# Altium footprint library Connectors.PcbLib: 120 footprints (part 5 of 8)
Each footprint in its own frame and in the unit in brackets; x right, y up, seen from the top. Pads: shape width x height; smd on the part's side, far side on the other; paste and mask are expansions set on the pad; w line width, h text height; cw(c..) or ccw(c..) is an arc to the next point about the centre after c.
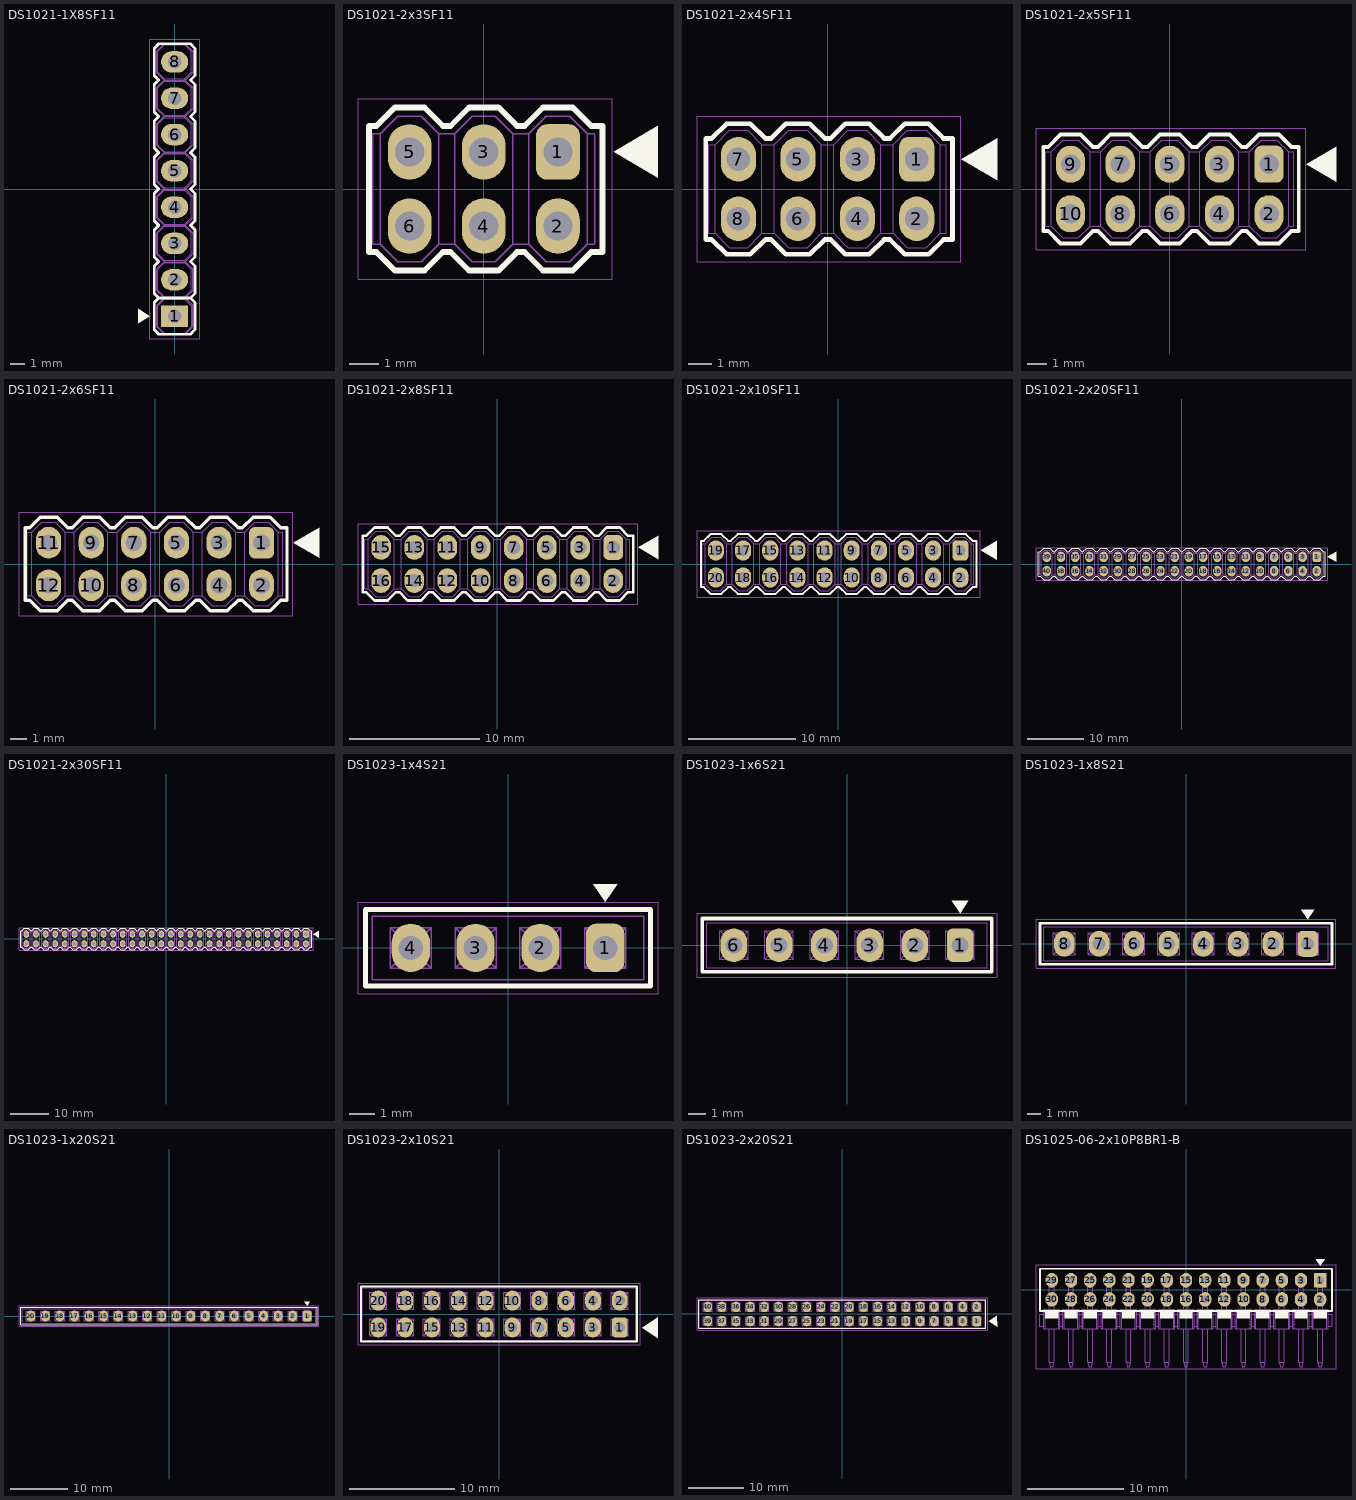
[diagram p4: the footprints below, top view; thin cyan lines are the x and y axes]

## DS1021-1X8SF11 [mm] "PLS-8 Connector, A = 3mm, B = 6.1mm"
pads (8):
  rect 1.9x1.5 hole 0.95: 1(0,-8.89)
  oval 1.9x1.5 hole 0.95: 2(0,-6.35) 3(0,-3.81) 4(0,-1.27) 5(0,1.27) 6(0,3.81) 7(0,6.35) 8(0,8.89)
Top Overlay:
  region: -1.746,-8.89 -2.54,-8.394 -2.54,-9.386
  lines w0.2: -1.111,-7.62 -1.429,-7.938 -1.429,-9.842 -1.111,-10.16 1.111,-10.16 1.429,-9.842 1.429,-7.937 1.111,-7.62 ; -1.111,-7.62 -1.429,-7.302 -1.429,-5.397 -1.111,-5.08 -1.429,-4.763 -1.429,-2.857 -1.111,-2.54 -1.429,-2.222 -1.429,-0.318 -1.111,0 -1.429,0.318 -1.429,2.222 -1.111,2.54 -1.429,2.857 -1.429,4.763 -1.111,5.08 -1.429,5.397 -1.429,7.302 -1.111,7.62 -1.429,7.938 -1.429,9.842 -1.111,10.16 1.111,10.16 1.429,9.843 1.429,7.938 1.111,7.62 1.429,7.303 1.429,5.398 1.111,5.08 1.429,4.763 1.429,2.858 1.111,2.54 1.429,2.223 1.429,0.318 1.111,0 1.429,-0.317 1.429,-2.222 1.111,-2.54 1.429,-2.857 1.429,-4.762 1.111,-5.08 1.429,-5.397 1.429,-7.302 1.111,-7.62 ; -1.111,-7.62 1.111,-7.62
Top Courtyard:
  lines w0.025: -1.75,-10.47 1.75,-10.47 1.75,10.47 -1.75,10.47 -1.75,-10.47
Top Assembly:
  drawing of 1025 lines, arcs and shapes, not listed
  text ".Designator" at 2.993,-4.511 h2
3D body "1x8 TH Pitch 2_54mm.X_T": height 9.2, standoff -3.5, extent -1.27,-10.16 1.27,10.16

## DS1021-2x3SF11 [mm] "PLD-6 Connector, A = 3mm, B = 6.1mm"
height 8.5
pads (6):
  rrect50% 1.5x1.9 hole 1: 1(2.54,1.27)
  oval 1.5x1.9 hole 1: 2(2.54,-1.27) 3(0,1.27) 4(0,-1.27) 5(-2.54,1.27) 6(-2.54,-1.27)
Top Overlay:
  region: 4.445,1.27 5.969,2.159 5.969,0.381
  lines w0.2: -3.937,-2.159 -3.937,2.159 -3.683,2.159 -3.048,2.794 -2.032,2.794 -1.397,2.159 -1.143,2.159 -0.508,2.794 0.508,2.794 1.143,2.159 1.397,2.159 2.032,2.794 3.048,2.794 3.683,2.159 4.064,2.159 4.064,-2.159 3.683,-2.159 3.048,-2.794 2.032,-2.794 1.397,-2.159 1.143,-2.159 0.508,-2.794 -0.508,-2.794 -1.143,-2.159 -1.397,-2.159 -2.032,-2.794 -3.048,-2.794 -3.683,-2.159 -3.937,-2.159
Top Courtyard:
  lines w0.025: -4.31,-3.1 -4.31,3.1 4.41,3.1 4.41,-3.1 -4.31,-3.1
Top Assembly:
  lines w0.05: -3.54,-1.9 -2.94,-2.5 -2.14,-2.5 -1.54,-1.9 ; -3.54,-1.9 -3.81,-1.9 -3.81,1.9 -3.54,1.9 ; -3.54,-1.9 -3.54,1.9 ; -3.54,1.9 -2.94,2.5 -2.14,2.5 -1.54,1.9 ; -2.86,-1.59 -2.673,-1.403 ; -2.86,-1.59 -2.22,-1.59 ; -2.86,-1.59 -2.86,-0.95 ; -2.86,-0.95 -2.673,-1.137 ; -2.86,-0.95 -2.22,-0.95 ; -2.86,0.95 -2.673,1.137 ; -2.86,0.95 -2.86,1.59 ; -2.86,0.95 -2.22,0.95 ; -2.86,1.59 -2.673,1.403 ; -2.86,1.59 -2.22,1.59 ; -2.673,-1.403 -2.407,-1.403 ; -2.673,-1.403 -2.673,-1.137 ; -2.673,-1.137 -2.407,-1.137 ; -2.673,1.137 -2.673,1.403 ; -2.673,1.137 -2.407,1.137 ; -2.673,1.403 -2.407,1.403 ; -2.407,-1.403 -2.22,-1.59 ; -2.407,-1.403 -2.407,-1.137 ; -2.407,-1.137 -2.22,-0.95 ; -2.407,1.137 -2.22,0.95 ; -2.407,1.137 -2.407,1.403 ; -2.407,1.403 -2.22,1.59 ; -2.22,-1.59 -2.22,-0.95 ; -2.22,0.95 -2.22,1.59 ; -1.54,-1.9 -1.54,1.9 ; -1.54,-1.9 -1,-1.9 ; -1.54,1.9 -1,1.9 ; -1,-1.9 -0.4,-2.5 0.4,-2.5 1,-1.9 ; -1,-1.9 -1,1.9 ; -1,1.9 -0.4,2.5 0.4,2.5 1,1.9 ; -0.32,-1.59 -0.133,-1.403 ; -0.32,-1.59 0.32,-1.59 ; -0.32,-1.59 -0.32,-0.95 ; -0.32,-0.95 -0.133,-1.137 ; -0.32,-0.95 0.32,-0.95 ; -0.32,0.95 -0.133,1.137 ; -0.32,0.95 -0.32,1.59 ; -0.32,0.95 0.32,0.95 ; -0.32,1.59 -0.133,1.403 ; -0.32,1.59 0.32,1.59 ; -0.133,-1.403 0.133,-1.403 ; -0.133,-1.403 -0.133,-1.137 ; -0.133,-1.137 0.133,-1.137 ; -0.133,1.137 -0.133,1.403 ; -0.133,1.137 0.133,1.137 ; -0.133,1.403 0.133,1.403 ; 0.133,-1.403 0.32,-1.59 ; 0.133,-1.403 0.133,-1.137 ; 0.133,-1.137 0.32,-0.95 ; 0.133,1.137 0.32,0.95 ; 0.133,1.137 0.133,1.403 ; 0.133,1.403 0.32,1.59 ; 0.32,-1.59 0.32,-0.95 ; 0.32,0.95 0.32,1.59 ; 1,-1.9 1,1.9 ; 1,-1.9 1.54,-1.9 ; 1,1.9 1.54,1.9 ; 1.54,-1.9 2.14,-2.5 2.94,-2.5 3.54,-1.9 ; 1.54,-1.9 1.54,1.9 ; 1.54,1.9 2.14,2.5 2.94,2.5 3.54,1.9 ; 2.22,-1.59 2.407,-1.403 ; 2.22,-1.59 2.86,-1.59 ; 2.22,-1.59 2.22,-0.95 ; 2.22,-0.95 2.407,-1.137 ; 2.22,-0.95 2.86,-0.95 ; 2.22,0.95 2.407,1.137 ; 2.22,0.95 2.22,1.59 ; 2.22,0.95 2.86,0.95 ; 2.22,1.59 2.407,1.403 ; 2.22,1.59 2.86,1.59 ; 2.407,-1.403 2.673,-1.403 ; 2.407,-1.403 2.407,-1.137 ; 2.407,-1.137 2.673,-1.137 ; 2.407,1.137 2.407,1.403 ; 2.407,1.137 2.673,1.137 ; 2.407,1.403 2.673,1.403 ; 2.673,-1.403 2.86,-1.59 ; 2.673,-1.403 2.673,-1.137 ; 2.673,-1.137 2.86,-0.95 ; 2.673,1.137 2.86,0.95 ; 2.673,1.137 2.673,1.403 ; 2.673,1.403 2.86,1.59 ; 2.86,-1.59 2.86,-0.95 ; 2.86,0.95 2.86,1.59 ; 3.54,-1.9 3.54,1.9 ; 3.54,-1.9 3.81,-1.9 3.81,1.9 3.54,1.9
  text ".Designator" at -4.511,3.357 h2
3D body "PLD_6.x_t": height 8.7, standoff -2.9, extent -3.81,-2.5 3.81,2.5

## DS1021-2x4SF11 [mm] "PLD-8 Connector, A = 3mm, B = 6.1mm"
height 8.5
pads (8):
  rrect50% 1.5x1.9 hole 1: 1(3.81,1.27)
  oval 1.5x1.9 hole 1: 2(3.81,-1.27) 3(1.27,1.27) 4(1.27,-1.27) 5(-1.27,1.27) 6(-1.27,-1.27) 7(-3.81,1.27) 8(-3.81,-1.27)
Top Overlay:
  region: 5.715,1.27 7.239,2.159 7.239,0.381
  lines w0.2: -5.207,-2.159 -5.207,2.159 -4.953,2.159 -4.318,2.794 -3.302,2.794 -2.667,2.159 -2.413,2.159 -1.778,2.794 -0.762,2.794 -0.127,2.159 0.127,2.159 0.762,2.794 1.778,2.794 2.413,2.159 2.667,2.159 3.302,2.794 4.318,2.794 4.953,2.159 5.334,2.159 5.334,-2.159 4.953,-2.159 4.318,-2.794 3.302,-2.794 2.667,-2.159 2.413,-2.159 1.778,-2.794 0.762,-2.794 0.127,-2.159 -0.127,-2.159 -0.762,-2.794 -1.778,-2.794 -2.413,-2.159 -2.667,-2.159 -3.302,-2.794 -4.318,-2.794 -4.953,-2.159 -5.207,-2.159
Top Courtyard:
  lines w0.025: -5.58,-3.1 -5.58,3.1 5.68,3.1 5.68,-3.1 -5.58,-3.1
Top Assembly:
  lines w0.05: -4.81,-1.9 -4.81,1.9 ; -4.81,-1.9 -4.21,-2.5 -3.41,-2.5 -2.81,-1.9 ; -4.81,-1.9 -4.81,1.9 ; -4.81,-1.9 -5.08,-1.9 -5.08,1.9 -4.81,1.9 ; -4.81,1.9 -4.21,2.5 -3.41,2.5 -2.81,1.9 ; -4.13,-1.59 -3.943,-1.403 ; -4.13,-1.59 -3.49,-1.59 ; -4.13,-1.59 -4.13,-0.95 ; -4.13,-0.95 -3.943,-1.137 ; -4.13,-0.95 -3.49,-0.95 ; -4.13,0.95 -3.943,1.137 ; -4.13,0.95 -3.49,0.95 ; -4.13,0.95 -4.13,1.59 ; -4.13,1.59 -3.943,1.403 ; -4.13,1.59 -3.49,1.59 ; -3.943,-1.403 -3.677,-1.403 ; -3.943,-1.403 -3.943,-1.137 ; -3.943,-1.137 -3.677,-1.137 ; -3.943,1.137 -3.677,1.137 ; -3.943,1.137 -3.943,1.403 ; -3.943,1.403 -3.677,1.403 ; -3.677,-1.403 -3.49,-1.59 ; -3.677,-1.403 -3.677,-1.137 ; -3.677,-1.137 -3.49,-0.95 ; -3.677,1.137 -3.677,1.403 ; -3.677,1.137 -3.49,0.95 ; -3.677,1.403 -3.49,1.59 ; -3.49,-1.59 -3.49,-0.95 ; -3.49,0.95 -3.49,1.59 ; -2.81,-1.9 -2.81,1.9 ; -2.81,-1.9 -2.27,-1.9 ; -2.81,1.9 -2.27,1.9 ; -2.27,-1.9 -1.67,-2.5 -0.87,-2.5 -0.27,-1.9 ; -2.27,-1.9 -2.27,1.9 ; -2.27,1.9 -1.67,2.5 -0.87,2.5 -0.27,1.9 ; -1.59,-1.59 -1.403,-1.403 ; -1.59,-1.59 -0.95,-1.59 ; -1.59,-1.59 -1.59,-0.95 ; -1.59,-0.95 -1.403,-1.137 ; -1.59,-0.95 -0.95,-0.95 ; -1.59,0.95 -1.403,1.137 ; -1.59,0.95 -1.59,1.59 ; -1.59,0.95 -0.95,0.95 ; -1.59,1.59 -1.403,1.403 ; -1.59,1.59 -0.95,1.59 ; -1.403,-1.403 -1.137,-1.403 ; -1.403,-1.403 -1.403,-1.137 ; -1.403,-1.137 -1.137,-1.137 ; -1.403,1.137 -1.403,1.403 ; -1.403,1.137 -1.137,1.137 ; -1.403,1.403 -1.137,1.403 ; -1.137,-1.403 -0.95,-1.59 ; -1.137,-1.403 -1.137,-1.137 ; -1.137,-1.137 -0.95,-0.95 ; -1.137,1.137 -0.95,0.95 ; -1.137,1.137 -1.137,1.403 ; -1.137,1.403 -0.95,1.59 ; -0.95,-1.59 -0.95,-0.95 ; -0.95,0.95 -0.95,1.59 ; -0.27,-1.9 -0.27,1.9 ; -0.27,-1.9 0.27,-1.9 ; -0.27,1.9 0.27,1.9 ; 0.27,-1.9 0.87,-2.5 1.67,-2.5 2.27,-1.9 ; 0.27,-1.9 0.27,1.9 ; 0.27,1.9 0.87,2.5 1.67,2.5 2.27,1.9 ; 0.95,-1.59 1.137,-1.403 ; 0.95,-1.59 1.59,-1.59 ; 0.95,-1.59 0.95,-0.95 ; 0.95,-0.95 1.137,-1.137 ; 0.95,-0.95 1.59,-0.95 ; 0.95,0.95 1.137,1.137 ; 0.95,0.95 0.95,1.59 ; 0.95,0.95 1.59,0.95 ; 0.95,1.59 1.137,1.403 ; 0.95,1.59 1.59,1.59 ; 1.137,-1.403 1.403,-1.403 ; 1.137,-1.403 1.137,-1.137 ; 1.137,-1.137 1.403,-1.137 ; 1.137,1.137 1.137,1.403 ; 1.137,1.137 1.403,1.137 ; 1.137,1.403 1.403,1.403 ; 1.403,-1.403 1.59,-1.59 ; 1.403,-1.403 1.403,-1.137 ; 1.403,-1.137 1.59,-0.95 ; 1.403,1.137 1.59,0.95 ; 1.403,1.137 1.403,1.403 ; 1.403,1.403 1.59,1.59 ; 1.59,-1.59 1.59,-0.95 ; 1.59,0.95 1.59,1.59 ; 2.27,-1.9 2.27,1.9 ; 2.27,-1.9 2.81,-1.9 ; 2.27,1.9 2.81,1.9 ; 2.81,-1.9 3.41,-2.5 4.21,-2.5 4.81,-1.9 ; 2.81,-1.9 2.81,1.9 ; 2.81,1.9 3.41,2.5 4.21,2.5 4.81,1.9 ; 3.49,-1.59 3.677,-1.403 ; 3.49,-1.59 4.13,-1.59 ; 3.49,-1.59 3.49,-0.95 ; 3.49,-0.95 3.677,-1.137 ; 3.49,-0.95 4.13,-0.95 ; 3.49,0.95 3.677,1.137 ; 3.49,0.95 3.49,1.59 ; 3.49,0.95 4.13,0.95 ; 3.49,1.59 3.677,1.403 ; 3.49,1.59 4.13,1.59 ; 3.677,-1.403 3.943,-1.403 ; 3.677,-1.403 3.677,-1.137 ; 3.677,-1.137 3.943,-1.137 ; 3.677,1.137 3.677,1.403 ; 3.677,1.137 3.943,1.137 ; 3.677,1.403 3.943,1.403 ; 3.943,-1.403 4.13,-1.59 ; 3.943,-1.403 3.943,-1.137 ; 3.943,-1.137 4.13,-0.95 ; 3.943,1.137 4.13,0.95 ; 3.943,1.137 3.943,1.403 ; 3.943,1.403 4.13,1.59 ; 4.13,-1.59 4.13,-0.95 ; 4.13,0.95 4.13,1.59 ; 4.81,-1.9 4.81,1.9 ; 4.81,-1.9 5.08,-1.9 5.08,1.9 4.81,1.9
  text ".Designator" at -4.511,3.357 h2
3D body "PLD_8.x_t": height 8.7, standoff -2.9, extent -5.08,-2.5 5.08,2.5

## DS1021-2x5SF11 [mm] "PLD-10 Connector, A = 3mm, B = 6.1mm"
height 8.5
pads (10):
  rrect50% 1.5x1.9 hole 1: 1(5.08,1.27)
  oval 1.5x1.9 hole 1: 2(5.08,-1.27) 3(2.54,1.27) 4(2.54,-1.27) 5(0,1.27) 6(0,-1.27) 7(-2.54,1.27) 8(-2.54,-1.27) 9(-5.08,1.27) 10(-5.08,-1.27)
Top Overlay:
  region: 6.985,1.27 8.509,2.159 8.509,0.381
  lines w0.2: -6.477,-2.159 -6.477,2.159 -6.223,2.159 -5.588,2.794 -4.572,2.794 -3.937,2.159 -3.683,2.159 -3.048,2.794 -2.032,2.794 -1.397,2.159 -1.143,2.159 -0.508,2.794 0.508,2.794 1.143,2.159 1.397,2.159 2.032,2.794 3.048,2.794 3.683,2.159 3.937,2.159 4.572,2.794 5.588,2.794 6.223,2.159 6.604,2.159 6.604,-2.159 6.223,-2.159 5.588,-2.794 4.572,-2.794 3.937,-2.159 3.683,-2.159 3.048,-2.794 2.032,-2.794 1.397,-2.159 1.143,-2.159 0.508,-2.794 -0.508,-2.794 -1.143,-2.159 -1.397,-2.159 -2.032,-2.794 -3.048,-2.794 -3.683,-2.159 -3.937,-2.159 -4.572,-2.794 -5.588,-2.794 -6.223,-2.159 -6.477,-2.159
Top Courtyard:
  lines w0.025: -6.85,-3.1 -6.85,3.1 6.95,3.1 6.95,-3.1 -6.85,-3.1
Top Assembly:
  drawing of 174 lines, arcs and shapes, not listed
  text ".Designator" at -4.511,3.357 h2
3D body "PLD_10.x_t": height 8.7, standoff -2.9, extent -6.35,-2.5 6.35,2.5

## DS1021-2x6SF11 [mm] "PLD-12 Connector, A = 3mm, B = 6.1mm"
height 8.5
pads (12):
  rrect50% 1.5x1.9 hole 1: 1(6.35,1.27)
  oval 1.5x1.9 hole 1: 2(6.35,-1.27) 3(3.81,1.27) 4(3.81,-1.27) 5(1.27,1.27) 6(1.27,-1.27) 7(-1.27,1.27) 8(-1.27,-1.27) 9(-3.81,1.27) 10(-3.81,-1.27) 11(-6.35,1.27) 12(-6.35,-1.27)
Top Overlay:
  region: 8.255,1.27 9.779,2.159 9.779,0.381
  lines w0.2: -7.747,-2.159 -7.493,-2.159 -6.858,-2.794 -5.842,-2.794 -5.207,-2.159 -4.953,-2.159 -4.318,-2.794 -3.302,-2.794 -2.667,-2.159 -2.413,-2.159 -1.778,-2.794 -0.762,-2.794 -0.127,-2.159 0.127,-2.159 0.762,-2.794 1.778,-2.794 2.413,-2.159 2.667,-2.159 3.302,-2.794 4.318,-2.794 4.953,-2.159 5.207,-2.159 5.842,-2.794 6.858,-2.794 7.493,-2.159 7.874,-2.159 7.874,2.159 7.493,2.159 6.858,2.794 5.842,2.794 5.207,2.159 4.953,2.159 4.318,2.794 3.302,2.794 2.667,2.159 2.413,2.159 1.778,2.794 0.762,2.794 0.127,2.159 -0.127,2.159 -0.762,2.794 -1.778,2.794 -2.413,2.159 -2.667,2.159 -3.302,2.794 -4.318,2.794 -4.953,2.159 -5.207,2.159 -5.842,2.794 -6.858,2.794 -7.493,2.159 -7.747,2.159 -7.747,-2.159
Top Courtyard:
  lines w0.025: -8.12,-3.1 8.22,-3.1 8.22,3.1 -8.12,3.1 -8.12,-3.1
Top Assembly:
  drawing of 208 lines, arcs and shapes, not listed
  text ".Designator" at -4.511,3.357 h2
3D body "PLD_12.x_t": height 8.7, standoff -2.9, extent -7.62,-2.5 7.62,2.5

## DS1021-2x8SF11 [mm] "PLD-16 Connector, A = 3mm, B = 6.1mm"
height 8.5
pads (16):
  rrect50% 1.5x1.9 hole 1: 1(8.89,1.27)
  oval 1.5x1.9 hole 1: 2(8.89,-1.27) 3(6.35,1.27) 4(6.35,-1.27) 5(3.81,1.27) 6(3.81,-1.27) 7(1.27,1.27) 8(1.27,-1.27) 9(-1.27,1.27) 10(-1.27,-1.27) 11(-3.81,1.27) 12(-3.81,-1.27) 13(-6.35,1.27) 14(-6.35,-1.27) 15(-8.89,1.27) 16(-8.89,-1.27)
Top Overlay:
  region: 10.795,1.27 12.319,2.159 12.319,0.381
  lines w0.2: -10.287,-2.159 -10.287,2.159 -10.033,2.159 -9.398,2.794 -8.382,2.794 -7.747,2.159 -7.493,2.159 -6.858,2.794 -5.842,2.794 -5.207,2.159 -4.953,2.159 -4.318,2.794 -3.302,2.794 -2.667,2.159 -2.413,2.159 -1.778,2.794 -0.762,2.794 -0.127,2.159 0.127,2.159 0.762,2.794 1.778,2.794 2.413,2.159 2.667,2.159 3.302,2.794 4.318,2.794 4.953,2.159 5.207,2.159 5.842,2.794 6.858,2.794 7.493,2.159 7.747,2.159 8.382,2.794 9.398,2.794 10.033,2.159 10.414,2.159 10.414,-2.159 10.033,-2.159 9.398,-2.794 8.382,-2.794 7.747,-2.159 7.493,-2.159 6.858,-2.794 5.842,-2.794 5.207,-2.159 4.953,-2.159 4.318,-2.794 3.302,-2.794 2.667,-2.159 2.413,-2.159 1.778,-2.794 0.762,-2.794 0.127,-2.159 -0.127,-2.159 -0.762,-2.794 -1.778,-2.794 -2.413,-2.159 -2.667,-2.159 -3.302,-2.794 -4.318,-2.794 -4.953,-2.159 -5.207,-2.159 -5.842,-2.794 -6.858,-2.794 -7.493,-2.159 -7.747,-2.159 -8.382,-2.794 -9.398,-2.794 -10.033,-2.159 -10.287,-2.159
Top Courtyard:
  lines w0.025: -10.66,-3.1 -10.66,3.1 10.76,3.1 10.76,-3.1 -10.66,-3.1
Top Assembly:
  drawing of 276 lines, arcs and shapes, not listed
  text ".Designator" at -4.511,3.357 h2
3D body "PLD_16.x_t": height 8.7, standoff -2.9, extent -10.16,-2.5 10.16,2.5

## DS1021-2x10SF11 [mm] "PLD-20 Connector, A = 3mm, B = 6.1mm"
height 8.5
pads (20):
  rrect50% 1.5x1.9 hole 1: 1(11.43,1.27)
  oval 1.5x1.9 hole 1: 2(11.43,-1.27) 3(8.89,1.27) 4(8.89,-1.27) 5(6.35,1.27) 6(6.35,-1.27) 7(3.81,1.27) 8(3.81,-1.27) 9(1.27,1.27) 10(1.27,-1.27) 11(-1.27,1.27) 12(-1.27,-1.27) 13(-3.81,1.27) 14(-3.81,-1.27) 15(-6.35,1.27) 16(-6.35,-1.27) 17(-8.89,1.27) 18(-8.89,-1.27) 19(-11.43,1.27) 20(-11.43,-1.27)
Top Overlay:
  region: 13.335,1.27 14.859,2.159 14.859,0.381
  lines w0.2: -12.827,-2.159 -12.827,2.159 -12.573,2.159 -11.938,2.794 -10.922,2.794 -10.287,2.159 -10.033,2.159 -9.398,2.794 -8.382,2.794 -7.747,2.159 -7.493,2.159 -6.858,2.794 -5.842,2.794 -5.207,2.159 -4.953,2.159 -4.318,2.794 -3.302,2.794 -2.667,2.159 -2.413,2.159 -1.778,2.794 -0.762,2.794 -0.127,2.159 0.127,2.159 0.762,2.794 1.778,2.794 2.413,2.159 2.667,2.159 3.302,2.794 4.318,2.794 4.953,2.159 5.207,2.159 5.842,2.794 6.858,2.794 7.493,2.159 7.747,2.159 8.382,2.794 9.398,2.794 10.033,2.159 10.287,2.159 10.922,2.794 11.938,2.794 12.573,2.159 12.954,2.159 12.954,-2.159 12.573,-2.159 11.938,-2.794 10.922,-2.794 10.287,-2.159 10.033,-2.159 9.398,-2.794 8.382,-2.794 7.747,-2.159 7.493,-2.159 6.858,-2.794 5.842,-2.794 5.207,-2.159 4.953,-2.159 4.318,-2.794 3.302,-2.794 2.667,-2.159 2.413,-2.159 1.778,-2.794 0.762,-2.794 0.127,-2.159 -0.127,-2.159 -0.762,-2.794 -1.778,-2.794 -2.413,-2.159 -2.667,-2.159 -3.302,-2.794 -4.318,-2.794 -4.953,-2.159 -5.207,-2.159 -5.842,-2.794 -6.858,-2.794 -7.493,-2.159 -7.747,-2.159 -8.382,-2.794 -9.398,-2.794 -10.033,-2.159 -10.287,-2.159 -10.922,-2.794 -11.938,-2.794 -12.573,-2.159 -12.827,-2.159
Top Courtyard:
  lines w0.025: -13.2,-3.1 -13.2,3.1 13.3,3.1 13.3,-3.1 -13.2,-3.1
Top Assembly:
  drawing of 344 lines, arcs and shapes, not listed
  text ".Designator" at -4.511,3.357 h2
3D body "PLD_20.x_t": height 8.7, standoff -2.9, extent -12.7,-2.5 12.7,2.5

## DS1021-2x20SF11 [mm] "PLD-40 Connector, A = 3mm, B = 6.1mm"
height 8.5
pads (40):
  rrect50% 1.5x1.9 hole 1: 1(24.13,1.27)
  oval 1.5x1.9 hole 1: 2(24.13,-1.27) 3(21.59,1.27) 4(21.59,-1.27) 5(19.05,1.27) 6(19.05,-1.27) 7(16.51,1.27) 8(16.51,-1.27) 9(13.97,1.27) 10(13.97,-1.27) 11(11.43,1.27) 12(11.43,-1.27) 13(8.89,1.27) 14(8.89,-1.27) 15(6.35,1.27) 16(6.35,-1.27) 17(3.81,1.27) 18(3.81,-1.27) 19(1.27,1.27) 20(1.27,-1.27) 21(-1.27,1.27) 22(-1.27,-1.27) 23(-3.81,1.27) 24(-3.81,-1.27) 25(-6.35,1.27) 26(-6.35,-1.27) 27(-8.89,1.27) 28(-8.89,-1.27) 29(-11.43,1.27) 30(-11.43,-1.27) 31(-13.97,1.27) 32(-13.97,-1.27) 33(-16.51,1.27) 34(-16.51,-1.27) 35(-19.05,1.27) 36(-19.05,-1.27) 37(-21.59,1.27) 38(-21.59,-1.27) 39(-24.13,1.27) 40(-24.13,-1.27)
Top Overlay:
  drawing of 165 lines, arcs and shapes, not listed
Top Courtyard:
  lines w0.025: -26.05,-2.9 -26.05,2.9 26.05,2.9 26.05,-2.9 -26.05,-2.9
Top Assembly:
  drawing of 684 lines, arcs and shapes, not listed
  text ".Designator" at -4.511,3.357 h2
3D body "PLD_40.x_t": height 8.7, standoff -2.9, extent -25.4,-2.5 25.4,2.5

## DS1021-2x30SF11 [mm] "PLD-60 Connector, A = 3mm, B = 6.1mm"
height 8.5
pads (60):
  rrect50% 1.5x1.9 hole 1: 1(36.83,1.27)
  oval 1.5x1.9 hole 1: 2(36.83,-1.27) 3(34.29,1.27) 4(34.29,-1.27) 5(31.75,1.27) 6(31.75,-1.27) 7(29.21,1.27) 8(29.21,-1.27) 9(26.67,1.27) 10(26.67,-1.27) 11(24.13,1.27) 12(24.13,-1.27) 13(21.59,1.27) 14(21.59,-1.27) 15(19.05,1.27) 16(19.05,-1.27) 17(16.51,1.27) 18(16.51,-1.27) 19(13.97,1.27) 20(13.97,-1.27) 21(11.43,1.27) 22(11.43,-1.27) 23(8.89,1.27) 24(8.89,-1.27) 25(6.35,1.27) 26(6.35,-1.27) 27(3.81,1.27) 28(3.81,-1.27) 29(1.27,1.27) 30(1.27,-1.27) 31(-1.27,1.27) 32(-1.27,-1.27) 33(-3.81,1.27) 34(-3.81,-1.27) 35(-6.35,1.27) 36(-6.35,-1.27) 37(-8.89,1.27) 38(-8.89,-1.27) 39(-11.43,1.27) 40(-11.43,-1.27) 41(-13.97,1.27) 42(-13.97,-1.27) 43(-16.51,1.27) 44(-16.51,-1.27) 45(-19.05,1.27) 46(-19.05,-1.27) 47(-21.59,1.27) 48(-21.59,-1.27) 49(-24.13,1.27) 50(-24.13,-1.27) 51(-26.67,1.27) 52(-26.67,-1.27) 53(-29.21,1.27) 54(-29.21,-1.27) 55(-31.75,1.27) 56(-31.75,-1.27) 57(-34.29,1.27) 58(-34.29,-1.27) 59(-36.83,1.27) 60(-36.83,-1.27)
Top Overlay:
  drawing of 245 lines, arcs and shapes, not listed
Top Courtyard:
  lines w0.025: -38.75,-2.9 38.75,-2.9 38.75,2.9 -38.75,2.9 -38.75,-2.9
Top Assembly:
  drawing of 1024 lines, arcs and shapes, not listed
  text ".Designator" at -4.511,3.357 h2
3D body "PLD_60.x_t": height 8.7, standoff -2.9, extent -38.1,-2.5 38.1,2.5

## DS1023-1x4S21 [mm] "PBS-4 connector"
height 8.5
pads (4):
  rrect50% 1.5x1.9 hole 0.95: 1(3.81,0)
  oval 1.5x1.9 hole 0.95: 2(1.27,0) 3(-1.27,0) 4(-3.81,0)
Top Overlay:
  region: 3.81,1.805 3.347,2.5 4.273,2.5
  lines w0.2: -5.58,-1.5 -5.58,1.5 5.58,1.5 5.58,-1.5 -5.58,-1.5
Top Courtyard:
  lines w0.025: -5.88,-1.8 -5.88,1.8 5.88,1.8 5.88,-1.8 -5.88,-1.8
Top Assembly:
  lines w0.05: -4.31,-0.25 -3.31,-0.25 ; -4.31,-0.2 -3.31,-0.2 ; -4.31,0.2 -3.31,0.2 ; -4.31,0.25 -3.31,0.25 ; -4.29,-0.2 -4.29,0.2 ; -4.01,-0.2 -4.01,0.2 ; -3.61,-0.2 -3.61,0.2 ; -3.33,-0.2 -3.33,0.2 ; -1.77,-0.25 -0.77,-0.25 ; -1.77,-0.2 -0.77,-0.2 ; -1.77,0.2 -0.77,0.2 ; -1.77,0.25 -0.77,0.25 ; -1.75,-0.2 -1.75,0.2 ; -1.47,-0.2 -1.47,0.2 ; -1.07,-0.2 -1.07,0.2 ; -0.79,-0.2 -0.79,0.2 ; 0.77,-0.25 1.77,-0.25 ; 0.77,-0.2 1.77,-0.2 ; 0.77,0.2 1.77,0.2 ; 0.77,0.25 1.77,0.25 ; 0.79,-0.2 0.79,0.2 ; 1.07,-0.2 1.07,0.2 ; 1.47,-0.2 1.47,0.2 ; 1.75,-0.2 1.75,0.2 ; 3.31,-0.25 4.31,-0.25 ; 3.31,-0.2 4.31,-0.2 ; 3.31,0.2 4.31,0.2 ; 3.31,0.25 4.31,0.25 ; 3.33,-0.2 3.33,0.2 ; 3.61,-0.2 3.61,0.2 ; 4.01,-0.2 4.01,0.2 ; 4.29,-0.2 4.29,0.2 ; -4.61,-0.8 -3.01,-0.8 ; -4.61,-0.8 -4.31,-0.5 ; -4.61,-0.8 -4.61,0.8 ; -4.61,0.8 -4.31,0.5 ; -4.61,0.8 -3.01,0.8 ; -4.31,-0.5 -3.31,-0.5 ; -4.31,-0.5 -4.31,0.5 ; -4.31,0.5 -3.31,0.5 ; -3.31,-0.5 -3.01,-0.8 ; -3.31,-0.5 -3.31,0.5 ; -3.31,0.5 -3.01,0.8 ; -3.01,-0.8 -3.01,0.8 ; -2.07,-0.8 -1.77,-0.5 ; -2.07,-0.8 -2.07,0.8 ; -2.07,-0.8 -0.47,-0.8 ; -2.07,0.8 -1.77,0.5 ; -2.07,0.8 -0.47,0.8 ; -1.77,-0.5 -1.77,0.5 ; -1.77,-0.5 -0.77,-0.5 ; -1.77,0.5 -0.77,0.5 ; -0.77,-0.5 -0.47,-0.8 ; -0.77,-0.5 -0.77,0.5 ; -0.77,0.5 -0.47,0.8 ; -0.47,-0.8 -0.47,0.8 ; 0.47,-0.8 2.07,-0.8 ; 0.47,-0.8 0.77,-0.5 ; 0.47,-0.8 0.47,0.8 ; 0.47,0.8 0.77,0.5 ; 0.47,0.8 2.07,0.8 ; 0.77,-0.5 1.77,-0.5 ; 0.77,-0.5 0.77,0.5 ; 0.77,0.5 1.77,0.5 ; 1.77,-0.5 2.07,-0.8 ; 1.77,-0.5 1.77,0.5 ; 1.77,0.5 2.07,0.8 ; 2.07,-0.8 2.07,0.8 ; 3.01,-0.8 3.31,-0.5 ; 3.01,-0.8 3.01,0.8 ; 3.01,-0.8 4.61,-0.8 ; 3.01,0.8 3.31,0.5 ; 3.01,0.8 4.61,0.8 ; 3.31,-0.5 3.31,0.5 ; 3.31,-0.5 4.31,-0.5 ; 3.31,0.5 4.31,0.5 ; 4.31,-0.5 4.61,-0.8 ; 4.31,-0.5 4.31,0.5 ; 4.31,0.5 4.61,0.8 ; 4.61,-0.8 4.61,0.8 ; -5.33,-1.25 5.33,-1.25 5.33,1.25 -5.33,1.25 -5.33,-1.25
  text ".Designator" at -4.511,2.047 h2
3D body "DS1023-1x4S21.x_t": height 8.6, standoff -2.9, extent -5.33,-1.25 5.33,1.25

## DS1023-1x6S21 [mm] "PBS-6 connector"
height 8.5
pads (6):
  rrect50% 1.5x1.9 hole 0.95: 1(6.35,0)
  oval 1.5x1.9 hole 0.95: 2(3.81,0) 3(1.27,0) 4(-1.27,0) 5(-3.81,0) 6(-6.35,0)
Top Overlay:
  region: 6.35,1.805 5.887,2.5 6.813,2.5
  lines w0.2: -8.12,1.5 -8.12,-1.5 8.12,-1.5 8.12,1.5 -8.1,1.5
Top Courtyard:
  lines w0.025: -8.42,-1.8 -8.42,1.8 8.42,1.8 8.42,-1.8 -8.42,-1.8
Top Assembly:
  lines w0.05: -6.85,-0.25 -5.85,-0.25 ; -6.85,-0.2 -5.85,-0.2 ; -6.85,0.2 -5.85,0.2 ; -6.85,0.25 -5.85,0.25 ; -6.83,-0.2 -6.83,0.2 ; -6.55,-0.2 -6.55,0.2 ; -6.15,-0.2 -6.15,0.2 ; -5.87,-0.2 -5.87,0.2 ; -4.31,-0.25 -3.31,-0.25 ; -4.31,-0.2 -3.31,-0.2 ; -4.31,0.2 -3.31,0.2 ; -4.31,0.25 -3.31,0.25 ; -4.29,-0.2 -4.29,0.2 ; -4.01,-0.2 -4.01,0.2 ; -3.61,-0.2 -3.61,0.2 ; -3.33,-0.2 -3.33,0.2 ; -1.77,-0.25 -0.77,-0.25 ; -1.77,-0.2 -0.77,-0.2 ; -1.77,0.2 -0.77,0.2 ; -1.77,0.25 -0.77,0.25 ; -1.75,-0.2 -1.75,0.2 ; -1.47,-0.2 -1.47,0.2 ; -1.07,-0.2 -1.07,0.2 ; -0.79,-0.2 -0.79,0.2 ; 0.77,-0.25 1.77,-0.25 ; 0.77,-0.2 1.77,-0.2 ; 0.77,0.2 1.77,0.2 ; 0.77,0.25 1.77,0.25 ; 0.79,-0.2 0.79,0.2 ; 1.07,-0.2 1.07,0.2 ; 1.47,-0.2 1.47,0.2 ; 1.75,-0.2 1.75,0.2 ; 3.31,-0.25 4.31,-0.25 ; 3.31,-0.2 4.31,-0.2 ; 3.31,0.2 4.31,0.2 ; 3.31,0.25 4.31,0.25 ; 3.33,-0.2 3.33,0.2 ; 3.61,-0.2 3.61,0.2 ; 4.01,-0.2 4.01,0.2 ; 4.29,-0.2 4.29,0.2 ; 5.85,-0.25 6.85,-0.25 ; 5.85,-0.2 6.85,-0.2 ; 5.85,0.2 6.85,0.2 ; 5.85,0.25 6.85,0.25 ; 5.87,-0.2 5.87,0.2 ; 6.15,-0.2 6.15,0.2 ; 6.55,-0.2 6.55,0.2 ; 6.83,-0.2 6.83,0.2 ; -7.15,-0.8 -5.55,-0.8 ; -7.15,-0.8 -6.85,-0.5 ; -7.15,-0.8 -7.15,0.8 ; -7.15,0.8 -6.85,0.5 ; -7.15,0.8 -5.55,0.8 ; -6.85,-0.5 -5.85,-0.5 ; -6.85,-0.5 -6.85,0.5 ; -6.85,0.5 -5.85,0.5 ; -5.85,-0.5 -5.55,-0.8 ; -5.85,-0.5 -5.85,0.5 ; -5.85,0.5 -5.55,0.8 ; -5.55,-0.8 -5.55,0.8 ; -4.61,-0.8 -3.01,-0.8 ; -4.61,-0.8 -4.31,-0.5 ; -4.61,-0.8 -4.61,0.8 ; -4.61,0.8 -4.31,0.5 ; -4.61,0.8 -3.01,0.8 ; -4.31,-0.5 -3.31,-0.5 ; -4.31,-0.5 -4.31,0.5 ; -4.31,0.5 -3.31,0.5 ; -3.31,-0.5 -3.01,-0.8 ; -3.31,-0.5 -3.31,0.5 ; -3.31,0.5 -3.01,0.8 ; -3.01,-0.8 -3.01,0.8 ; -2.07,-0.8 -0.47,-0.8 ; -2.07,-0.8 -1.77,-0.5 ; -2.07,-0.8 -2.07,0.8 ; -2.07,0.8 -1.77,0.5 ; -2.07,0.8 -0.47,0.8 ; -1.77,-0.5 -0.77,-0.5 ; -1.77,-0.5 -1.77,0.5 ; -1.77,0.5 -0.77,0.5 ; -0.77,-0.5 -0.47,-0.8 ; -0.77,-0.5 -0.77,0.5 ; -0.77,0.5 -0.47,0.8 ; -0.47,-0.8 -0.47,0.8 ; 0.47,-0.8 0.77,-0.5 ; 0.47,-0.8 0.47,0.8 ; 0.47,-0.8 2.07,-0.8 ; 0.47,0.8 0.77,0.5 ; 0.47,0.8 2.07,0.8 ; 0.77,-0.5 0.77,0.5 ; 0.77,-0.5 1.77,-0.5 ; 0.77,0.5 1.77,0.5 ; 1.77,-0.5 2.07,-0.8 ; 1.77,-0.5 1.77,0.5 ; 1.77,0.5 2.07,0.8 ; 2.07,-0.8 2.07,0.8 ; 3.01,-0.8 4.61,-0.8 ; 3.01,-0.8 3.31,-0.5 ; 3.01,-0.8 3.01,0.8 ; 3.01,0.8 3.31,0.5 ; 3.01,0.8 4.61,0.8 ; 3.31,-0.5 4.31,-0.5 ; 3.31,-0.5 3.31,0.5 ; 3.31,0.5 4.31,0.5 ; 4.31,-0.5 4.61,-0.8 ; 4.31,-0.5 4.31,0.5 ; 4.31,0.5 4.61,0.8 ; 4.61,-0.8 4.61,0.8 ; 5.55,-0.8 5.85,-0.5 ; 5.55,-0.8 5.55,0.8 ; 5.55,-0.8 7.15,-0.8 ; 5.55,0.8 5.85,0.5 ; 5.55,0.8 7.15,0.8 ; 5.85,-0.5 5.85,0.5 ; 5.85,-0.5 6.85,-0.5 ; 5.85,0.5 6.85,0.5 ; 6.85,-0.5 7.15,-0.8 ; 6.85,-0.5 6.85,0.5 ; 6.85,0.5 7.15,0.8 ; 7.15,-0.8 7.15,0.8 ; -7.87,-1.25 7.87,-1.25 7.87,1.25 -7.87,1.25 -7.87,-1.25
  text ".Designator" at -4.511,2.047 h2
3D body "DS1023-1x6S21.x_t": height 8.6, standoff -2.9, extent -7.87,-1.25 7.87,1.25

## DS1023-1x8S21 [mm] "PBS-8 connector"
height 8.5
pads (8):
  rrect50% 1.5x1.9 hole 0.95: 1(8.89,0)
  oval 1.5x1.9 hole 0.95: 2(6.35,0) 3(3.81,0) 4(1.27,0) 5(-1.27,0) 6(-3.81,0) 7(-6.35,0) 8(-8.89,0)
Top Overlay:
  region: 8.89,1.805 8.427,2.5 9.353,2.5
  lines w0.2: -10.66,-1.5 10.66,-1.5 10.66,1.5 -10.66,1.5 -10.66,-1.5
Top Courtyard:
  lines w0.025: -10.96,-1.8 10.96,-1.8 10.96,1.8 -10.96,1.8 -10.96,-1.8
Top Assembly:
  drawing of 164 lines, arcs and shapes, not listed
  text ".Designator" at -4.511,2.047 h2
3D body "DS1023-1x8S21.x_t": height 8.6, standoff -2.9, extent -10.41,-1.25 10.41,1.25

## DS1023-1x20S21 [mm] "PBS-20 connector"
height 8.5
pads (20):
  rrect50% 1.5x1.9 hole 0.95: 1(24.13,0)
  oval 1.5x1.9 hole 0.95: 2(21.59,0) 3(19.05,0) 4(16.51,0) 5(13.97,0) 6(11.43,0) 7(8.89,0) 8(6.35,0) 9(3.81,0) 10(1.27,0) 11(-1.27,0) 12(-3.81,0) 13(-6.35,0) 14(-8.89,0) 15(-11.43,0) 16(-13.97,0) 17(-16.51,0) 18(-19.05,0) 19(-21.59,0) 20(-24.13,0)
Top Overlay:
  region: 24.13,1.805 23.667,2.5 24.593,2.5
  lines w0.2: -25.9,-1.5 -25.9,1.5 25.9,1.5 25.9,-1.5 -25.9,-1.5
Top Courtyard:
  lines w0.025: -26.2,-1.8 -26.2,1.8 26.2,1.8 26.2,-1.8 -26.2,-1.8
Top Assembly:
  drawing of 404 lines, arcs and shapes, not listed
  text ".Designator" at -4.511,2.047 h2
3D body "DS1023-1x20S21.x_t": height 8.6, standoff -2.9, extent -25.65,-1.25 25.65,1.25

## DS1023-2x10S21 [mm] "PBD-20 connector"
height 8.5
pads (20):
  rrect50% 1.5x1.9 hole 0.95: 1(11.43,-1.27)
  oval 1.5x1.9 hole 0.95: 2(11.43,1.27) 3(8.89,-1.27) 4(8.89,1.27) 5(6.35,-1.27) 6(6.35,1.27) 7(3.81,-1.27) 8(3.81,1.27) 9(1.27,-1.27) 10(1.27,1.27) 11(-1.27,-1.27) 12(-1.27,1.27) 13(-3.81,-1.27) 14(-3.81,1.27) 15(-6.35,-1.27) 16(-6.35,1.27) 17(-8.89,-1.27) 18(-8.89,1.27) 19(-11.43,-1.27) 20(-11.43,1.27)
Top Overlay:
  region: 13.55,-1.3 15.05,-0.3 15.05,-2.3
  lines w0.2: -13.05,-2.6 -13.05,2.6 13.05,2.6 13.05,-2.6 -13.05,-2.6
Top Courtyard:
  lines w0.025: -13.35,-2.9 -13.35,2.9 13.35,2.9 13.35,-2.9 -13.35,-2.9
Top Assembly:
  drawing of 564 lines, arcs and shapes, not listed
  text ".Designator" at -4.511,3.357 h2
3D body "PBD_20.x_t": height 8.6, standoff -2.9, extent -12.95,-2.52 12.95,2.48

## DS1023-2x20S21 [mm] "PBD-40 connector"
height 8.5
pads (40):
  rrect50% 1.5x1.9 hole 0.95: 1(24.13,-1.27)
  oval 1.5x1.9 hole 0.95: 2(24.13,1.27) 3(21.59,-1.27) 4(21.59,1.27) 5(19.05,-1.27) 6(19.05,1.27) 7(16.51,-1.27) 8(16.51,1.27) 9(13.97,-1.27) 10(13.97,1.27) 11(11.43,-1.27) 12(11.43,1.27) 13(8.89,-1.27) 14(8.89,1.27) 15(6.35,-1.27) 16(6.35,1.27) 17(3.81,-1.27) 18(3.81,1.27) 19(1.27,-1.27) 20(1.27,1.27) 21(-1.27,-1.27) 22(-1.27,1.27) 23(-3.81,-1.27) 24(-3.81,1.27) 25(-6.35,-1.27) 26(-6.35,1.27) 27(-8.89,-1.27) 28(-8.89,1.27) 29(-11.43,-1.27) 30(-11.43,1.27) 31(-13.97,-1.27) 32(-13.97,1.27) 33(-16.51,-1.27) 34(-16.51,1.27) 35(-19.05,-1.27) 36(-19.05,1.27) 37(-21.59,-1.27) 38(-21.59,1.27) 39(-24.13,-1.27) 40(-24.13,1.27)
Top Overlay:
  region: 26.25,-1.3 27.75,-0.3 27.75,-2.3
  lines w0.2: -25.75,-2.6 25.75,-2.6 25.75,2.6 -25.75,2.6 -25.75,-2.6
Top Courtyard:
  lines w0.025: -26.05,-2.9 26.05,-2.9 26.05,2.9 -26.05,2.9 -26.05,-2.9
Top Assembly:
  drawing of 1124 lines, arcs and shapes, not listed
  text ".Designator" at -4.511,3.357 h2
3D body "PBD_40.x_t": height 8.6, standoff -2.9, extent -25.65,-2.48 25.65,2.52

## DS1025-06-2x10P8BR1-B [mm]
pads (30):
  rect 1.3x1.5 hole 0.8: 1(14,1)
  oval 1.3x1.5 hole 0.8: 2(14,-1) 3(12,1) 4(12,-1) 5(10,1) 6(10,-1) 7(8,1) 8(8,-1) 9(6,1) 10(6,-1) 11(4,1) 12(4,-1) 13(2,1) 14(2,-1) 15(0,1) 16(0,-1) 17(-2,1) 18(-2,-1) 19(-4,1) 20(-4,-1) 21(-6,1) 22(-6,-1) 23(-8,1) 24(-8,-1) 25(-10,1) 26(-10,-1) 27(-12,1) 28(-12,-1) 29(-14,1) 30(-14,-1)
Top Overlay:
  rectangle: 13.3,-3 14.7,-2.2
  rectangle: 11.3,-3 12.7,-2.2
  rectangle: 9.3,-3 10.7,-2.2
  rectangle: 7.3,-3 8.7,-2.2
  rectangle: 5.3,-3 6.7,-2.2
  rectangle: 3.3,-3 4.7,-2.2
  rectangle: 1.3,-3 2.7,-2.2
  rectangle: -0.7,-3 0.7,-2.2
  rectangle: -2.7,-3 -1.3,-2.2
  rectangle: -4.7,-3 -3.3,-2.2
  rectangle: -6.7,-3 -5.3,-2.2
  rectangle: -8.7,-3 -7.3,-2.2
  rectangle: -10.7,-3 -9.3,-2.2
  rectangle: -12.7,-3 -11.3,-2.2
  rectangle: -14.7,-3 -13.3,-2.2
  region: 14,2.5 13.533,3.2 14.467,3.2
  lines w0.2: -15.25,-2.2 -15.25,2.2 15.25,2.2 15.25,-2.2 -15.25,-2.2
Top Courtyard:
  lines w0.025: -15.65,-8.25 -15.65,2.6 15.65,2.6 15.65,-8.25 -15.65,-8.25
Top Assembly:
  drawing of 320 lines, arcs and shapes, not listed
  text ".Designator" at -4.511,3.047 h2
3D body "DS1025-06-2x10P8BR1-B.x_t": height 4.01, standoff -2.79, extent -15.25,-8.05 15.25,1.25